# EAGLE library part DUALBUF (library turns)
Two buffers in one package
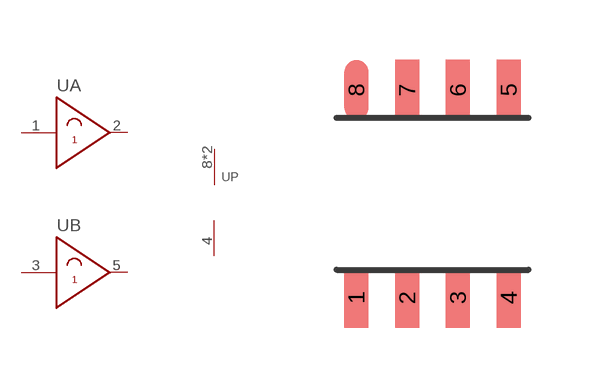
[diagram p0: symbol with the pads of SO8; footprint SO8]

Designator prefix U; gates A=BUF B=BUF P=PWRN

## DUALBUFD  [SO8]
1  A:IN  in
2  A:OUT  out
3  B:IN  in
4  P:GND  pwr
5  B:OUT  out
7  P:VCC  pwr
8  P:VCC  pwr

## Footprint SO8 (pad centres in mm)
smd 0.6 x 1.5: 1 -1.905,-2.6; 2 -0.635,-2.6; 3 0.635,-2.6; 4 1.905,-2.6; 5 1.905,2.6; 6 0.635,2.6; 7 -0.635,2.6; 8 -1.905,2.6